# EAGLE library part RTD2660 (library rtd2660_board)
Realtek RTD2660 flat panel display controller, 128-pin E-PAD LQFP 14 x 20 mm
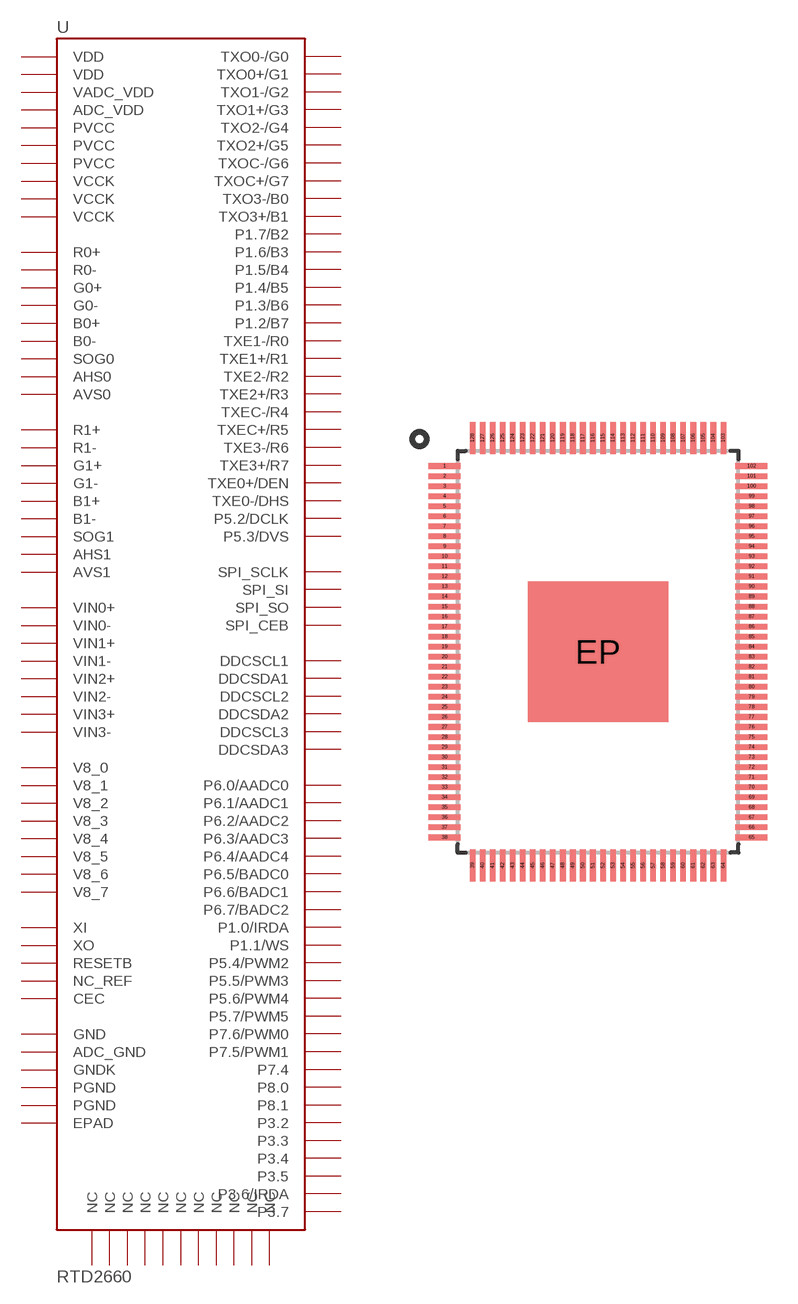
[diagram p10: symbol with the pads of LQFP128-14X20-EP; footprint LQFP128-14X20-EP]

Designator prefix U

## RTD2660  [LQFP128-14X20-EP]
1  VDD  pas
2  NC_REF  pas
3  V8_0  pas
4  V8_1  pas
5  V8_2  pas
6  V8_3  pas
7  V8_4  pas
8  V8_5  pas
9  V8_6  pas
10  V8_7  pas
11  GND  pas
12  NC  pas
13  NC  pas
14  NC  pas
15  NC  pas
16  NC  pas
17  NC  pas
18  NC  pas
19  NC  pas
20  VDD  pas
21  AVS0  pas
22  AHS0  pas
23  ADC_VDD  pas
24  B0-  pas
25  B0+  pas
26  G0-  pas
27  G0+  pas
28  SOG0  pas
29  R0-  pas
30  R0+  pas
31  B1-  pas
32  B1+  pas
33  G1-  pas
34  G1+  pas
35  SOG1  pas
36  R1-  pas
37  R1+  pas
38  ADC_GND  pas
39  AHS1  pas
40  AVS1  pas
41  VIN0+  pas
42  VIN0-  pas
43  VIN1+  pas
44  VIN1-  pas
45  VIN2+  pas
46  VIN2-  pas
47  VIN3+  pas
48  VIN3-  pas
49  VADC_VDD  pas
50  P6.0/AADC0  pas
51  P6.1/AADC1  pas
52  P6.2/AADC2  pas
53  P6.3/AADC3  pas
54  P6.4/AADC4  pas
55  P6.5/BADC0  pas
56  P6.6/BADC1  pas
57  P6.7/BADC2  pas
58  DDCSCL1  pas
59  DDCSDA1  pas
60  VCCK  pas
61  GNDK  pas
62  PVCC  pas
63  NC  pas
64  P1.0/IRDA  pas
65  P1.1/WS  pas
66  P1.2/B7  pas
67  P1.3/B6  pas
68  P1.4/B5  pas
69  P1.5/B4  pas
70  P1.6/B3  pas
71  P1.7/B2  pas
72  NC  pas
73  VCCK  pas
74  TXO3+/B1  pas
75  TXO3-/B0  pas
76  TXOC+/G7  pas
77  TXOC-/G6  pas
78  TXO2+/G5  pas
79  TXO2-/G4  pas
80  TXO1+/G3  pas
81  TXO1-/G2  pas
82  TXO0+/G1  pas
83  TXO0-/G0  pas
84  PVCC  pas
85  PGND  pas
86  TXE3+/R7  pas
87  TXE3-/R6  pas
88  TXEC+/R5  pas
89  TXEC-/R4  pas
90  TXE2+/R3  pas
91  TXE2-/R2  pas
92  TXE1+/R1  pas
93  TXE1-/R0  pas
94  TXE0+/DEN  pas
95  TXE0-/DHS  pas
96  P5.2/DCLK  pas
97  P5.3/DVS  pas
98  P5.4/PWM2  pas
99  P5.5/PWM3  pas
100  P5.6/PWM4  pas
101  P5.7/PWM5  pas
102  P7.6/PWM0  pas
103  P7.5/PWM1  pas
104  P7.4  pas
105  P8.0  pas
106  PVCC  pas
107  PGND  pas
108  P8.1  pas
109  P3.2  pas
110  P3.3  pas
111  P3.4  pas
112  P3.5  pas
113  P3.6/IRDA  pas
114  P3.7  pas
115  SPI_SCLK  pas
116  SPI_SI  pas
117  SPI_SO  pas
118  SPI_CEB  pas
119  NC  pas
120  VCCK  pas
121  DDCSCL3  pas
122  DDCSDA3  pas
123  DDCSDA2  pas
124  DDCSCL2  pas
125  RESETB  pas
126  CEC  pas
127  XO  pas
128  XI  pas
EP  EPAD  pas

## Footprint LQFP128-14X20-EP (pad centres in mm)
128-lead E-PAD LQFP, body 14 x 20 mm, pitch 0.5 mm, lead span 16 x 22 mm. Exposed pad = GND.
smd 1.6 x 0.28: 1 -7.65,9.25; 2 -7.65,8.75; 3 -7.65,8.25; 4 -7.65,7.75; 5 -7.65,7.25; 6 -7.65,6.75; 7 -7.65,6.25; 8 -7.65,5.75; 9 -7.65,5.25; 10 -7.65,4.75; 11 -7.65,4.25; 12 -7.65,3.75; 13 -7.65,3.25; 14 -7.65,2.75; 15 -7.65,2.25; 16 -7.65,1.75; 17 -7.65,1.25; 18 -7.65,0.75; 19 -7.65,0.25; 20 -7.65,-0.25; 21 -7.65,-0.75; 22 -7.65,-1.25; 23 -7.65,-1.75; 24 -7.65,-2.25; 25 -7.65,-2.75; 26 -7.65,-3.25; 27 -7.65,-3.75; 28 -7.65,-4.25; 29 -7.65,-4.75; 30 -7.65,-5.25; 31 -7.65,-5.75; 32 -7.65,-6.25; 33 -7.65,-6.75; 34 -7.65,-7.25; 35 -7.65,-7.75; 36 -7.65,-8.25; 37 -7.65,-8.75; 38 -7.65,-9.25; 65 7.65,-9.25; 66 7.65,-8.75; 67 7.65,-8.25; 68 7.65,-7.75; 69 7.65,-7.25; 70 7.65,-6.75; 71 7.65,-6.25; 72 7.65,-5.75; 73 7.65,-5.25; 74 7.65,-4.75; 75 7.65,-4.25; 76 7.65,-3.75; 77 7.65,-3.25; 78 7.65,-2.75; 79 7.65,-2.25; 80 7.65,-1.75; 81 7.65,-1.25; 82 7.65,-0.75; 83 7.65,-0.25; 84 7.65,0.25; 85 7.65,0.75; 86 7.65,1.25; 87 7.65,1.75; 88 7.65,2.25; 89 7.65,2.75; 90 7.65,3.25; 91 7.65,3.75; 92 7.65,4.25; 93 7.65,4.75; 94 7.65,5.25; 95 7.65,5.75; 96 7.65,6.25; 97 7.65,6.75; 98 7.65,7.25; 99 7.65,7.75; 100 7.65,8.25; 101 7.65,8.75; 102 7.65,9.25
smd 0.28 x 1.6: 39 -6.25,-10.65; 40 -5.75,-10.65; 41 -5.25,-10.65; 42 -4.75,-10.65; 43 -4.25,-10.65; 44 -3.75,-10.65; 45 -3.25,-10.65; 46 -2.75,-10.65; 47 -2.25,-10.65; 48 -1.75,-10.65; 49 -1.25,-10.65; 50 -0.75,-10.65; 51 -0.25,-10.65; 52 0.25,-10.65; 53 0.75,-10.65; 54 1.25,-10.65; 55 1.75,-10.65; 56 2.25,-10.65; 57 2.75,-10.65; 58 3.25,-10.65; 59 3.75,-10.65; 60 4.25,-10.65; 61 4.75,-10.65; 62 5.25,-10.65; 63 5.75,-10.65; 64 6.25,-10.65; 103 6.25,10.65; 104 5.75,10.65; 105 5.25,10.65; 106 4.75,10.65; 107 4.25,10.65; 108 3.75,10.65; 109 3.25,10.65; 110 2.75,10.65; 111 2.25,10.65; 112 1.75,10.65; 113 1.25,10.65; 114 0.75,10.65; 115 0.25,10.65; 116 -0.25,10.65; 117 -0.75,10.65; 118 -1.25,10.65; 119 -1.75,10.65; 120 -2.25,10.65; 121 -2.75,10.65; 122 -3.25,10.65; 123 -3.75,10.65; 124 -4.25,10.65; 125 -4.75,10.65; 126 -5.25,10.65; 127 -5.75,10.65; 128 -6.25,10.65
smd 7 x 7: EP 0,0